# Altium footprint library Fuse_Holder.PcbLib: 1 footprints
Each footprint in its own frame and in the unit in brackets; x right, y up, seen from the top. Pads: shape width x height; smd on the part's side, far side on the other; paste and mask are expansions set on the pad; w line width, h text height; cw(c..) or ccw(c..) is an arc to the next point about the centre after c.
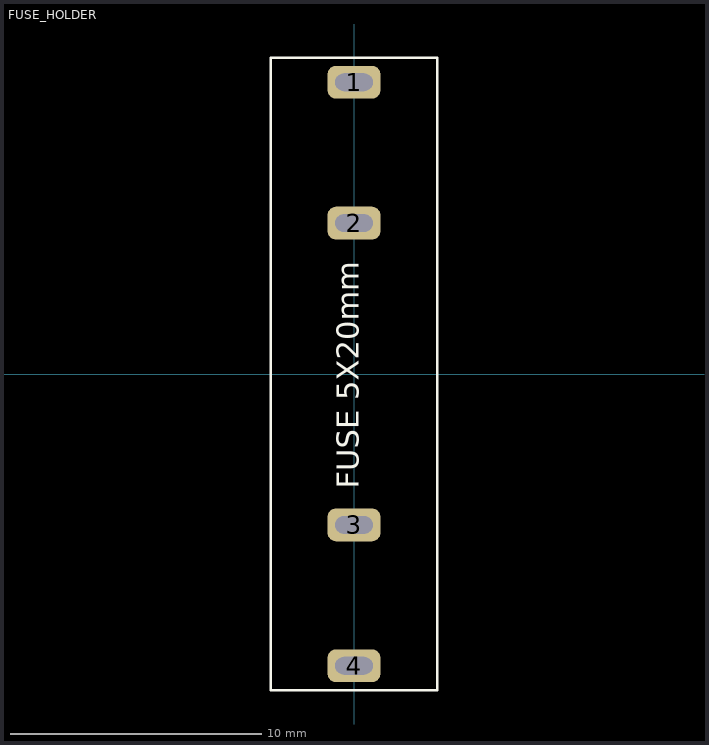
[diagram p0: the footprint, top view; thin cyan lines are the x and y axes]

## FUSE_HOLDER [mm] "FUSE_HOLDER"
pads (4):
  rrect50% 2.1x1.3 hole 0.7 slot 1.5 at 0 deg: 1(0,11.6) 2(0,6) 3(0,-6) 4(0,-11.6)
Top Overlay:
  lines w0.1: -3.302,-12.573 3.302,-12.573 3.302,12.573 -3.302,12.573 -3.302,-12.573
  text "FUSE 5X20mm" at 0.491,-4.572 h1.52
3D body "SimpleFuseHolder_5x20.step": height 9.33, standoff -3.5, extent -3.2,-11.8 3.2,-5.8
3D body "SimpleFuseHolder_5x20.step": height 9.33, standoff -3.5, extent -3.2,5.8 3.2,11.8
3D body "5x20_250V_v2.step": height -4.41, standoff -9.59, extent -2.6,-10 2.6,10